# Altium footprint library CHIP-Library.PcbLib: 345 footprints (part 2 of 22)
Each footprint in its own frame and in the unit in brackets; x right, y up, seen from the top. Pads: shape width x height; smd on the part's side, far side on the other; paste and mask are expansions set on the pad; w line width, h text height; cw(c..) or ccw(c..) is an arc to the next point about the centre after c.
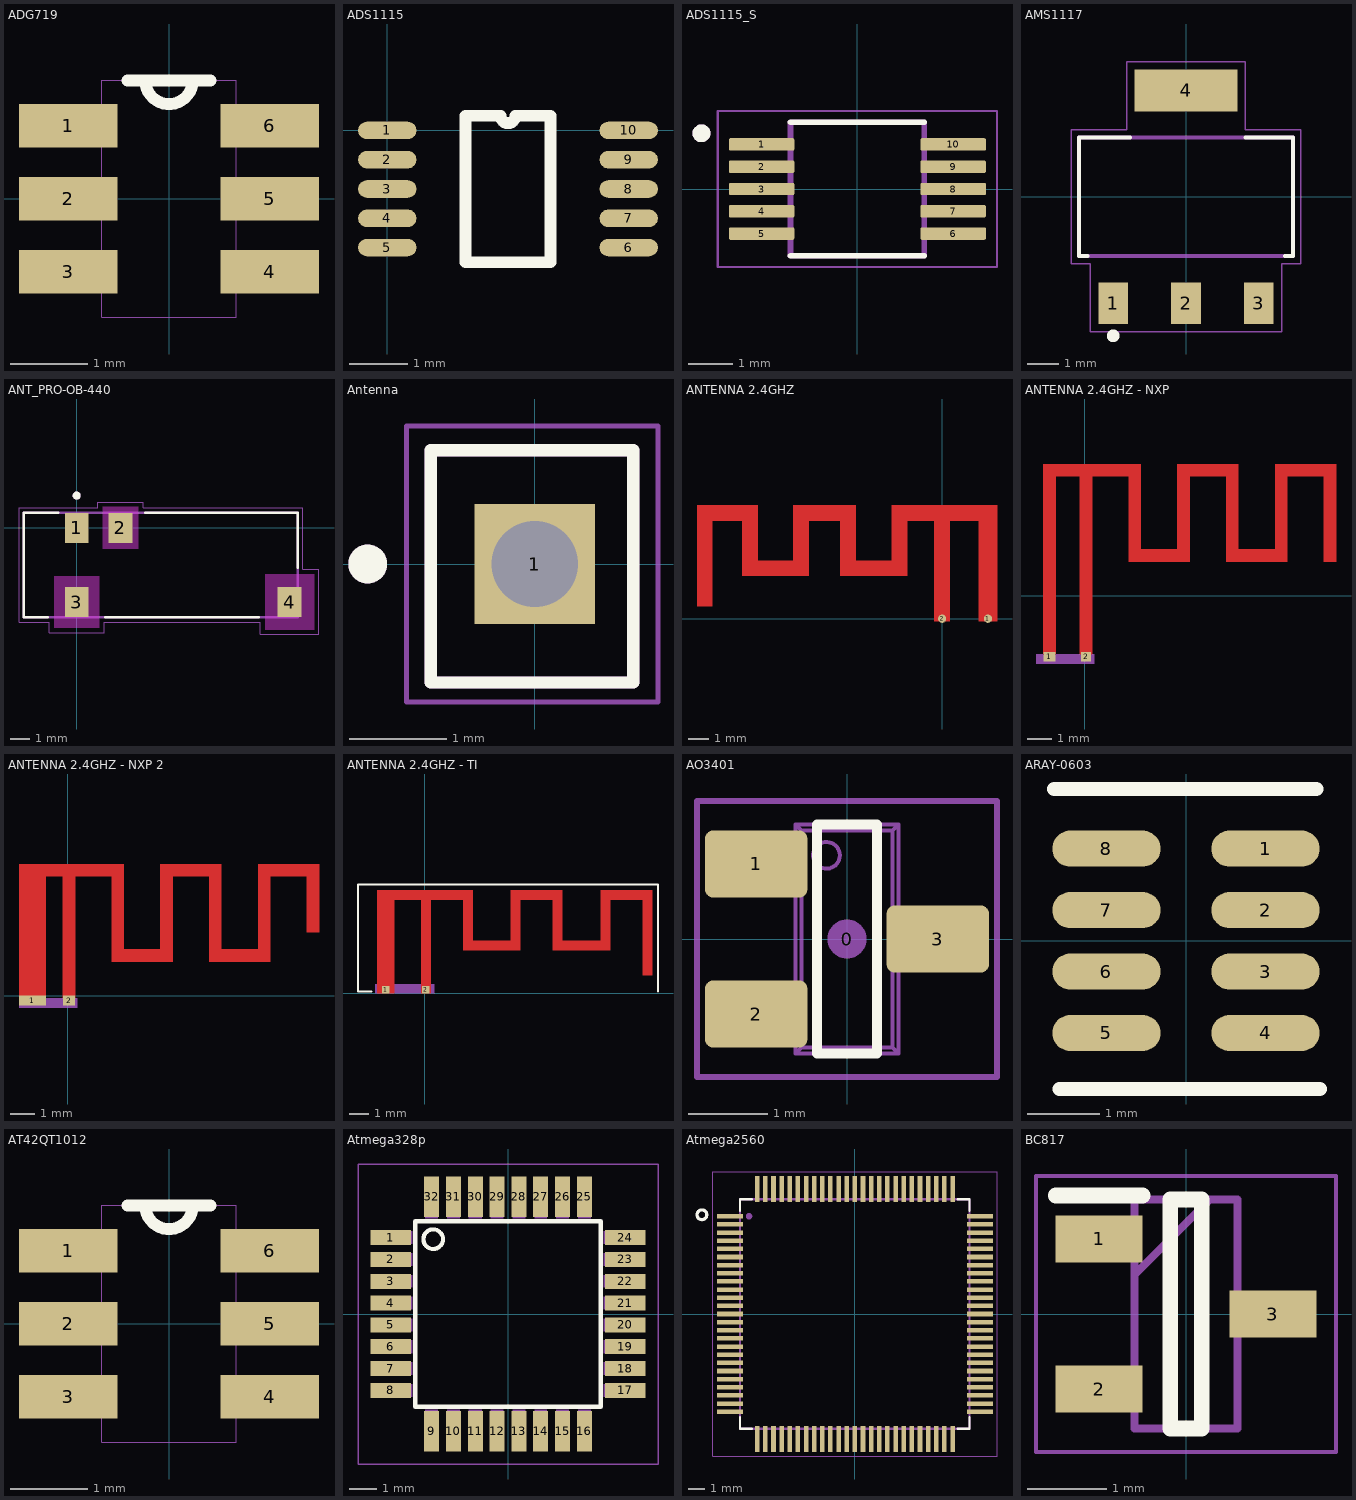
[diagram p1: the footprints below, top view; thin cyan lines are the x and y axes]

## ADG719 [mil]
pads (6):
  rect 50x22 smd: 1(-51,37) 2(-51,0) 3(-51,-37) 4(51,-37) 5(51,0) 6(51,37)
Top Overlay:
  lines w6: -21,60 -12,60 ; 21,60 12,60 ; -12,60 ccw(c0,60) 12,60 ; -12,60 12,60
Mechanical 4:
  lines w0: -59,-47 -59,-28 ; -59,-47 -34,-47 ; -59,-47 -59,-28 ; -59,-47 -34,-47 ; -59,-28 -34,-28 ; -59,-28 -34,-28 ; -59,-10 -59,10 ; -59,-10 -34,-10 ; -59,-10 -59,10 ; -59,-10 -34,-10 ; -59,10 -34,10 ; -59,10 -34,10 ; -59,28 -59,47 ; -59,28 -34,28 ; -59,28 -59,47 ; -59,28 -34,28 ; -59,47 -34,47 ; -59,47 -34,47 ; -34,-60 34,-60 ; -34,-60 -34,-47 ; -34,-60 34,-60 ; -34,-60 -34,-47 ; -34,-47 -34,-28 ; -34,-47 -34,-28 ; -34,-28 -34,-10 ; -34,-28 -34,-10 ; -34,-10 -34,10 ; -34,-10 -34,10 ; -34,10 -34,28 ; -34,10 -34,28 ; -34,28 -34,47 ; -34,28 -34,47 ; -34,47 -34,60 ; -34,47 -34,60 ; -34,60 -12,60 ; -34,60 -12,60 ; -12,60 ccw(c0,60) 12,60 ; -12,60 ccw(c0,60) 12,60 ; -12,60 12,60 ; -12,60 12,60 ; 12,60 34,60 ; 12,60 34,60 ; 34,-60 34,-47 ; 34,-60 34,-47 ; 34,-47 34,-28 ; 34,-47 59,-47 ; 34,-47 34,-28 ; 34,-47 59,-47 ; 34,-28 34,-10 ; 34,-28 59,-28 ; 34,-28 34,-10 ; 34,-28 59,-28 ; 34,-10 34,10 ; 34,-10 59,-10 ; 34,-10 34,10 ; 34,-10 59,-10 ; 34,10 34,28 ; 34,10 59,10 ; 34,10 34,28 ; 34,10 59,10 ; 34,28 34,47 ; 34,28 59,28 ; 34,28 34,47 ; 34,28 59,28 ; 34,47 34,60 ; 34,47 59,47 ; 34,47 34,60 ; 34,47 59,47 ; 59,-47 59,-28 ; 59,-47 59,-28 ; 59,-10 59,10 ; 59,-10 59,10 ; 59,28 59,47 ; 59,28 59,47
3D body "User Library-SOT23-6-2.STEP": height 57.09, standoff 0, extent -55.11,-57.09 55.13,57.08

## ADS1115 [mm] "MSOP 10 pitch 0.5mm"
pads (10):
  oval 1x0.3 smd: 1(0,0) 2(0,-0.5) 3(0,-1) 4(0,-1.5) 5(0,-2) 6(4.125,-2) 7(4.125,-1.5) 8(4.125,-1) 9(4.125,-0.5) 10(4.125,0)
Top Overlay:
  lines w0.2: 1.335,-2.25 1.335,0.25 1.938,0.25 ccw(c2.063,0.25) 2.187,0.25 2.79,0.25 2.79,-2.25 1.335,-2.25

## ADS1115_S [mm]
pads (10):
  rrect25% 1.47x0.28 smd: 1(-2.15,1) 2(-2.15,0.5) 3(-2.15,0) 4(-2.15,-0.5) 5(-2.15,-1) 6(2.15,-1) 7(2.15,-0.5) 8(2.15,0) 9(2.15,0.5) 10(2.15,1)
Top Overlay:
  circle w0.2: c-3.5,1.25 r0.1
  lines w0.127: -1.5,-1.5 1.5,-1.5 ; -1.5,1.5 1.5,1.5
Mechanical 13:
  circle w0.2: c-3.5,1.25 r0.1
  lines w0.127: -1.5,-1.5 1.5,-1.5 1.5,1.5 -1.5,1.5 -1.5,-1.5
Mechanical 15:
  lines w0.05: -3.135,-1.75 3.135,-1.75 3.135,1.75 -3.135,1.75 -3.135,-1.75
3D body "ads1115idgsr.stp": height 1.1, standoff 0, extent -2.606,-1.5 2.469,1.5

## AMS1117 [mm]
pads (4):
  rect 0.93x1.31 smd: 1(-2.29,-3.345) 2(0,-3.345) 3(2.29,-3.345)
  rect 3.24x1.31 smd: 4(0,3.345)
Top Overlay:
  circle w0.2: c-2.29,-4.373 r0.1
  lines w0.127: -3.1,-1.86 -3.36,-1.86 -3.36,1.86 -1.76,1.86 ; 1.87,1.86 3.36,1.86 3.36,-1.86 3.11,-1.86
Mechanical 4:
  lines w0.127: -3.36,-1.86 -3.36,1.86 ; -3.36,-1.86 3.36,-1.86 ; -3.36,-1.86 -3.36,1.86 ; -3.36,-1.86 3.36,-1.86 ; -3.36,1.86 3.36,1.86 ; -3.36,1.86 3.36,1.86 ; 3.36,-1.86 3.36,1.86 ; 3.36,-1.86 3.36,1.86
Mechanical 16:
  lines w0.05: -3.61,-2.11 -3.61,2.11 -1.87,2.11 -1.87,4.25 1.87,4.25 1.87,2.11 3.61,2.11 3.61,-2.11 3.01,-2.11 3.01,-4.25 -3.01,-4.25 -3.01,-2.11 -3.61,-2.11
3D body "User Library-AMS1117.step": height 1.87, standoff 0.01, extent -3.198,-3.5 3.302,3.5

## ANT_PRO-OB-440 [mm]
pads (4):
  rect 1.2x1.5 smd: 1(0,0) 2(2.2,0) 3(0,-3.73) 4(10.7,-3.73)
Top Overlay:
  circle w0.2: c0,1.62 r0.1
  lines w0.127: -1.445,-4.48 -2.65,-4.48 -2.65,0.75 -0.92,0.75 ; 1.445,-4.48 9.155,-4.48 ; 3.45,0.75 11.1,0.75 11.1,-2.01
Keep-Out Layer:
  region: 3.1,-1.05 1.3,-1.05 1.3,1.05 3.1,1.05
  region: 3.1,-1.05 1.3,-1.05 1.3,1.05 3.1,1.05
  region: 3.1,-1.05 1.3,-1.05 1.3,1.05 3.1,1.05
  region: 11.925,-5.13 9.475,-5.13 9.475,-2.33 11.925,-2.33
  region: 11.925,-5.13 9.475,-5.13 9.475,-2.33 11.925,-2.33
  region: 11.925,-5.13 9.475,-5.13 9.475,-2.33 11.925,-2.33
  region: 1.125,-5.03 -1.125,-5.03 -1.125,-2.43 1.125,-2.43
  region: 1.125,-5.03 -1.125,-5.03 -1.125,-2.43 1.125,-2.43
  region: 1.125,-5.03 -1.125,-5.03 -1.125,-2.43 1.125,-2.43
Mechanical 13:
  circle w0.2: c0,1.62 r0.1
  lines w0.127: -2.65,-4.48 11.1,-4.48 11.1,0.75 -2.65,0.75 -2.65,-4.48
Mechanical 15:
  lines w0.05: -2.9,-4.73 -2.9,1 1.05,1 1.05,1.3 3.35,1.3 3.35,1 11.35,1 11.35,-2.08 12.175,-2.08 12.175,-5.35 9.225,-5.35 9.225,-4.73 1.375,-4.73 1.375,-5.28 -1.375,-5.28 -1.375,-4.73 -2.9,-4.73
3D body "PRO-OB-440--3DModel-STEP-1.STEP": height 3.54, standoff 0.01, extent -2.684,-4.48 11.066,0.75

## Antenna [mm]
pads (1):
  rect 1.24x1.24 hole 0.89: 1(0,0)
Top Overlay:
  circle w0.2: c-1.72,0 r0.1
  lines w0.127: -1.07,-1.22 1.016,-1.22 1.016,1.17 -1.07,1.17 -1.07,-1.22
Mechanical 4:
  circle w0.2: c-1.72,0 r0.1
  circle w0.2: c-1.72,0 r0.1
  lines w0.127: -1.07,-1.17 -1.07,1.17 ; 1.016,-1.17 1.016,1.17 -1.07,1.17 ; -1.07,1.17 -1.07,-1.22 1.016,-1.22 1.016,1.143 0.989,1.17 -1.07,1.17
Mechanical 16:
  lines w0.05: -1.32,-1.42 1.27,-1.42 1.27,1.42 -1.32,1.42 -1.32,-1.42

## ANTENNA 2.4GHZ [mm] "ESP32 ANTENNA"
pads (2):
  round 0.4 smd paste-0.2: 1(2.237,0) 2(0,0)
Top Layer:
  region: -0.377,-0.114 0.377,-0.114 0.377,4.786 1.796,4.786 1.796,-0.114 2.677,-0.114 2.677,5.54 -2.45,5.54 -2.45,2.84 -4.207,2.84 -4.207,5.54 -7.261,5.54 -7.261,2.84 -9.007,2.84 -9.007,5.54 -11.961,5.54 -11.961,0.612 -11.207,0.612 -11.207,4.786 -9.761,4.786 -9.761,2.086 -6.507,2.086 -6.507,4.786 -4.961,4.786 -4.961,2.086 -1.696,2.086 -1.696,4.786 -0.377,4.786

## ANTENNA 2.4GHZ - NXP [mm] "ESP32 ANTENNA"
pads (2):
  rect 0.5x0.4 smd: 1(-1.45,-2.5)
  rect 0.4x0.4 smd: 2(0.05,-2.5)
Top Layer:
  region: 0.3,-2.4 -0.2,-2.4 -0.2,4.9 -1.2,4.9 -1.2,-2.4 -1.7,-2.4 -1.7,5.4 2.3,5.4 2.3,1.9 3.8,1.9 3.8,5.4 6.3,5.4 6.3,1.9 7.8,1.9 7.8,5.4 10.3,5.4 10.3,1.4 9.8,1.4 9.8,4.9 8.3,4.9 8.3,1.4 5.8,1.4 5.8,4.9 4.3,4.9 4.3,1.4 1.8,1.4 1.8,4.9 0.3,4.9
Mechanical 3:
  rectangle: -2,-2.8 0.4,-2.4

## ANTENNA 2.4GHZ - NXP 2 [mm] "ESP32 ANTENNA"
pads (2):
  rect 1.1x0.4 smd: 1(-1.45,-0.2)
  rect 0.5x0.4 smd: 2(0.05,-0.2)
Top Layer:
  region: 0.3,-0.1 -0.2,-0.1 -0.2,4.9 -0.9,4.9 -0.9,-0.1 -2,-0.1 -2,5.4 2.3,5.4 2.3,1.9 3.8,1.9 3.8,5.4 6.3,5.4 6.3,1.9 7.8,1.9 7.8,5.4 10.3,5.4 10.3,2.6 9.8,2.6 9.8,4.9 8.3,4.9 8.3,1.4 5.8,1.4 5.8,4.9 4.3,4.9 4.3,1.4 1.8,1.4 1.8,4.9 0.3,4.9
Mechanical 3:
  rectangle: -2,-0.5 0.4,-0.1

## ANTENNA 2.4GHZ - TI [mm] "TI ANTENNA"
pads (2):
  rect 0.4x0.4 smd: 1(-2.05,0.2) 2(0.05,0.2)
Top Layer:
  region: 0.3,0 -0.2,0 -0.2,4.9 -1.6,4.9 -1.6,0 -2.5,0 -2.5,5.4 2.5,5.4 2.5,2.76 4.5,2.76 4.5,5.4 7.2,5.4 7.2,2.76 9.2,2.76 9.2,5.4 11.9,5.4 11.9,0.96 11.4,0.96 11.4,4.9 9.7,4.9 9.7,2.26 6.7,2.26 6.7,4.9 5,4.9 5,2.26 2,2.26 2,4.9 0.3,4.9
Top Overlay:
  lines w0.1: -2.8,0.1 -3.5,0.1 -3.5,5.7 -2.5,5.7 12.2,5.7 12.2,0.1
Mechanical 27:
  rectangle: -2.6,0 0.5,0.5

## AO3401 [mm] "SOT23, 3 pin"
height 1.003
pads (4):
  round 0.5 on Mech15: 0(0,0)
  rrect25% 1.3x0.85 smd: 1(-1.15,0.95) 2(-1.15,-0.95) 3(1.15,0)
Top Overlay:
  lines w0.127: -0.381,-1.45 -0.381,1.45 0.381,1.45 0.381,-1.45 -0.381,-1.45
  text "." at -2.125,0.95 h1.4
Mechanical 13:
  circle w0.05: c-0.26,1.06 r0.169
  lines w0.05: -1.19,-1.19 -1.19,-0.71 ; -1.19,0.71 -1.19,1.19 ; -1.099,-1.19 -1.099,-0.71 ; -1.099,0.71 -1.099,1.19 ; -1.074,-1.19 -1.074,-0.71 ; -1.074,0.71 -1.074,1.19 ; -0.825,-1.19 -0.825,-0.71 ; -0.825,0.71 -0.825,1.19 ; -0.65,-1.19 -1.4,-1.19 -1.4,-0.71 -0.65,-0.71 ; -0.65,0.71 -1.4,0.71 -1.4,1.19 -0.65,1.19 ; 0.65,-0.24 1.4,-0.24 1.4,0.24 0.65,0.24 ; 0.825,-0.24 0.825,0.24 ; 1.074,-0.24 1.074,0.24 ; 1.099,-0.24 1.099,0.24 ; 1.19,-0.24 1.19,0.24 ; -0.65,-1.45 0.65,-1.45 ; -0.65,-1.45 -0.65,1.45 ; -0.65,-1.45 -0.576,-1.376 ; -0.65,1.45 -0.576,1.376 ; -0.65,1.45 0.65,1.45 ; -0.576,-1.376 0.576,-1.376 ; -0.576,-1.376 -0.576,1.376 ; -0.576,1.376 0.576,1.376 ; 0.576,-1.376 0.65,-1.45 ; 0.576,-1.376 0.576,1.376 ; 0.576,1.376 0.65,1.45 ; 0.65,-1.45 0.65,1.45
Mechanical 15:
  lines w0.076: -1.9,-1.75 -1.9,1.75 1.9,1.75 1.9,-1.75 -1.9,-1.75
3D body "SOT23-3.STEP": height 1.29, standoff -0.01, extent -1.4,-1.45 1.4,1.45

## ARAY-0603 [mm]
height 1.75
pads (8):
  oval 1.5x0.5 smd: 1(1.1,1.275) 2(1.1,0.425) 3(1.1,-0.425) 4(1.1,-1.275) 5(-1.1,-1.275) 6(-1.1,-0.425) 7(-1.1,0.425) 8(-1.1,1.275)
Top Overlay:
  lines w0.2: -1.825,2.1 1.8,2.1 ; -1.75,-2.05 0.706,-2.05 1.85,-2.05

## AT42QT1012 [mil]
pads (6):
  rect 50x22 smd: 1(-51,37) 2(-51,0) 3(-51,-37) 4(51,-37) 5(51,0) 6(51,37)
Top Overlay:
  lines w6: -21,60 -12,60 ; 21,60 12,60 ; -12,60 ccw(c0,60) 12,60 ; -12,60 12,60
Mechanical 4:
  lines w0: -59,-47 -59,-28 ; -59,-47 -34,-47 ; -59,-47 -59,-28 ; -59,-47 -34,-47 ; -59,-28 -34,-28 ; -59,-28 -34,-28 ; -59,-10 -59,10 ; -59,-10 -34,-10 ; -59,-10 -59,10 ; -59,-10 -34,-10 ; -59,10 -34,10 ; -59,10 -34,10 ; -59,28 -59,47 ; -59,28 -34,28 ; -59,28 -59,47 ; -59,28 -34,28 ; -59,47 -34,47 ; -59,47 -34,47 ; -34,-60 34,-60 ; -34,-60 -34,-47 ; -34,-60 34,-60 ; -34,-60 -34,-47 ; -34,-47 -34,-28 ; -34,-47 -34,-28 ; -34,-28 -34,-10 ; -34,-28 -34,-10 ; -34,-10 -34,10 ; -34,-10 -34,10 ; -34,10 -34,28 ; -34,10 -34,28 ; -34,28 -34,47 ; -34,28 -34,47 ; -34,47 -34,60 ; -34,47 -34,60 ; -34,60 -12,60 ; -34,60 -12,60 ; -12,60 ccw(c0,60) 12,60 ; -12,60 ccw(c0,60) 12,60 ; -12,60 12,60 ; -12,60 12,60 ; 12,60 34,60 ; 12,60 34,60 ; 34,-60 34,-47 ; 34,-60 34,-47 ; 34,-47 34,-28 ; 34,-47 59,-47 ; 34,-47 34,-28 ; 34,-47 59,-47 ; 34,-28 34,-10 ; 34,-28 59,-28 ; 34,-28 34,-10 ; 34,-28 59,-28 ; 34,-10 34,10 ; 34,-10 59,-10 ; 34,-10 34,10 ; 34,-10 59,-10 ; 34,10 34,28 ; 34,10 59,10 ; 34,10 34,28 ; 34,10 59,10 ; 34,28 34,47 ; 34,28 59,28 ; 34,28 34,47 ; 34,28 59,28 ; 34,47 34,60 ; 34,47 59,47 ; 34,47 34,60 ; 34,47 59,47 ; 59,-47 59,-28 ; 59,-47 59,-28 ; 59,-10 59,10 ; 59,-10 59,10 ; 59,28 59,47 ; 59,28 59,47
3D body "User Library-SOT23-6-2.STEP": height 57.09, standoff 0, extent -55.11,-57.09 55.13,57.08

## Atmega328p [mm]
pads (32):
  rect 1.5x0.55 smd: 1(-4.3,2.8) 2(-4.3,2) 3(-4.3,1.2) 4(-4.3,0.4) 5(-4.3,-0.4) 6(-4.3,-1.2) 7(-4.3,-2) 8(-4.3,-2.8) 17(4.3,-2.8) 18(4.3,-2) 19(4.3,-1.2) 20(4.3,-0.4) 21(4.3,0.4) 22(4.3,1.2) 23(4.3,2) 24(4.3,2.8)
  rect 0.55x1.5 smd: 9(-2.8,-4.3) 10(-2,-4.3) 11(-1.2,-4.3) 12(-0.4,-4.3) 13(0.4,-4.3) 14(1.2,-4.3) 15(2,-4.3) 16(2.8,-4.3) 25(2.8,4.3) 26(2,4.3) 27(1.2,4.3) 28(0.4,4.3) 29(-0.4,4.3) 30(-1.2,4.3) 31(-2,4.3) 32(-2.8,4.3)
Top Overlay:
  circle w0.152: c-2.743,2.743 r0.359
  lines w0.152: -3.4,-3.4 -3.4,3.4 3.4,3.4 3.4,-3.4 -3.4,-3.4
Mechanical 4:
  drawing of 64 lines, arcs and shapes, not listed
Mechanical 16:
  lines w0.05: -5.5,-5.5 -5.5,5.5 5.5,5.5 5.5,-5.5 -5.5,-5.5
3D body "User Library-TQFP32-4.STEP": height 1.01, standoff -0.14, extent -4.512,-4.512 4.512,4.512

## Atmega2560 [mm]
pads (100):
  rect 1.6x0.28 smd: 1(-7.68,6) 2(-7.68,5.5) 3(-7.68,5) 4(-7.68,4.5) 5(-7.68,4) 6(-7.68,3.5) 7(-7.68,3) 8(-7.68,2.5) 9(-7.68,2) 10(-7.68,1.5) 11(-7.68,1) 12(-7.68,0.5) 13(-7.68,0) 14(-7.68,-0.5) 15(-7.68,-1) 16(-7.68,-1.5) 17(-7.68,-2) 18(-7.68,-2.5) 19(-7.68,-3) 20(-7.68,-3.5) 21(-7.68,-4) 22(-7.68,-4.5) 23(-7.68,-5) 24(-7.68,-5.5) 25(-7.68,-6) 51(7.68,-6) 52(7.68,-5.5) 53(7.68,-5) 54(7.68,-4.5) 55(7.68,-4) 56(7.68,-3.5) 57(7.68,-3) 58(7.68,-2.5) 59(7.68,-2) 60(7.68,-1.5) 61(7.68,-1) 62(7.68,-0.5) 63(7.68,0) 64(7.68,0.5) 65(7.68,1) 66(7.68,1.5) 67(7.68,2) 68(7.68,2.502) 69(7.68,3) 70(7.68,3.5) 71(7.68,4) 72(7.68,4.5) 73(7.68,5) 74(7.68,5.5) 75(7.68,6)
  rect 0.28x1.6 smd: 26(-6,-7.68) 27(-5.5,-7.68) 28(-5,-7.68) 29(-4.5,-7.68) 30(-4,-7.68) 31(-3.5,-7.68) 32(-3,-7.68) 33(-2.5,-7.68) 34(-2,-7.68) 35(-1.5,-7.68) 36(-1,-7.68) 37(-0.5,-7.68) 38(0,-7.68) 39(0.5,-7.68) 40(1,-7.68) 41(1.5,-7.68) 42(2,-7.68) 43(2.5,-7.68) 44(3,-7.68) 45(3.5,-7.68) 46(4,-7.68) 47(4.5,-7.68) 48(5,-7.68) 49(5.5,-7.68) 50(6,-7.68) 76(6,7.68) 77(5.5,7.68) 78(5,7.68) 79(4.5,7.68) 80(4,7.68) 81(3.5,7.68) 82(3,7.68) 83(2.5,7.68) 84(2,7.68) 85(1.5,7.68) 86(1,7.68) 87(0.5,7.68) 88(0,7.68) 89(-0.5,7.68) 90(-1,7.68) 91(-1.5,7.68) 92(-2,7.68) 93(-2.5,7.68) 94(-3,7.68) 95(-3.5,7.68) 96(-4,7.68) 97(-4.5,7.68) 98(-5,7.68) 99(-5.5,7.68) 100(-6,7.68)
Top Overlay:
  circle w0.2: c-9.398,6.096 r0.3
  lines w0.127: -7.05,-6.32 -7.05,-7.05 -6.32,-7.05 ; -7.05,6.32 -7.05,7.05 -6.32,7.05 ; 6.32,-7.05 7.05,-7.05 7.05,-6.32 ; 6.32,7.05 7.05,7.05 7.05,6.32
Mechanical 4:
  circle w0.2: c-6.5,6 r0.1
  circle w0.2: c-6.5,6 r0.1
  lines w0.127: -7.05,-7.05 -7.05,7.05 ; -7.05,-7.05 7.05,-7.05 ; -7.05,-7.05 -7.05,7.05 ; -7.05,-7.05 7.05,-7.05 ; -7.05,7.05 7.05,7.05 ; -7.05,7.05 7.05,7.05 ; 7.05,-7.05 7.05,7.05 ; 7.05,-7.05 7.05,7.05
Mechanical 16:
  lines w0.05: -8.73,-8.73 -8.73,8.73 8.73,8.73 8.73,-8.73 -8.73,-8.73
3D body "User Library-100A-14x14.step": height -1.65, standoff -2.75, extent -7.999,-8 8.001,8

## BC817 [mm] "SOT23-3"
pads (3):
  rect 1.1x0.6 smd: 1(-1.1,0.95) 2(-1.1,-0.95) 3(1.1,0)
Top Overlay:
  lines w0.2: -1.65,1.5 -0.55,1.5 ; -0.2,-1.45 -0.2,1.45 0.2,1.45 0.2,-1.45 -0.2,-1.45
Mechanical 4:
  lines w0.05: -1.9,-1.75 -1.9,1.75 ; -1.9,-1.75 1.9,-1.75 ; -1.9,-1.75 -1.9,1.75 ; -1.9,-1.75 1.9,-1.75 ; -1.9,1.75 1.9,1.75 ; -1.9,1.75 1.9,1.75 ; 1.9,-1.75 1.9,1.75 ; 1.9,-1.75 1.9,1.75
  lines w0.1: -0.65,-1.45 -0.65,0.5 ; -0.65,-1.45 0.65,-1.45 ; -0.65,-1.45 -0.65,0.5 ; -0.65,-1.45 0.65,-1.45 ; -0.65,0.5 0.3,1.45 ; -0.65,0.5 -0.65,1.45 ; -0.65,0.5 0.3,1.45 ; -0.65,0.5 -0.65,1.45 ; -0.65,1.45 0.3,1.45 ; -0.65,1.45 0.3,1.45 ; 0.3,1.45 0.65,1.45 ; 0.3,1.45 0.65,1.45 ; 0.65,-1.45 0.65,1.45 ; 0.65,-1.45 0.65,1.45
3D body "CircuitWorks-SOT-23.step": height 1.11, standoff 0.01, extent -1.25,-1.5 1.25,1.5